# Altium schematic symbol library 2019-12-07_12-05-20.SchLib: 2 symbols
Pins are listed as number, name and electrical type; pins without a type are passive.

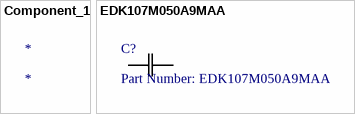
[diagram p0: symbols Component_1 to EDK107M050A9MAA]

## Component_1
designator *

## EDK107M050A9MAA
designator C?, comment Part Number: EDK107M050A9MAA
No Description Available; Vendor: KEMET; Built_By: EMA_UL_Team; Type: DEV; Manufacturer_Part_Number: EDK107M050A9MAA; Copyright: Copyright (C) 2018 Accelerated Designs. All rights reserved; RefDes: RefDes; Value: Value
footprint EXV-9M
pins: 1, 2